# Altium schematic symbol library AS150U_Custom.SchLib: 1 symbol
Pins are listed as number, name and electrical type; pins without a type are passive.

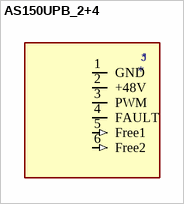
[diagram p0: symbol AS150UPB_2+4]

## AS150UPB_2+4
designator *  Reference: J
pins: 1 GND, 2 +48V, 3 PWM, 4 FAULT, 5 Free1 (in), 6 Free2 (in)